# Altium footprint library Sensors.PcbLib: 9 footprints
Each footprint in its own frame and in the unit in brackets; x right, y up, seen from the top. Pads: shape width x height; smd on the part's side, far side on the other; paste and mask are expansions set on the pad; w line width, h text height; cw(c..) or ccw(c..) is an arc to the next point about the centre after c.
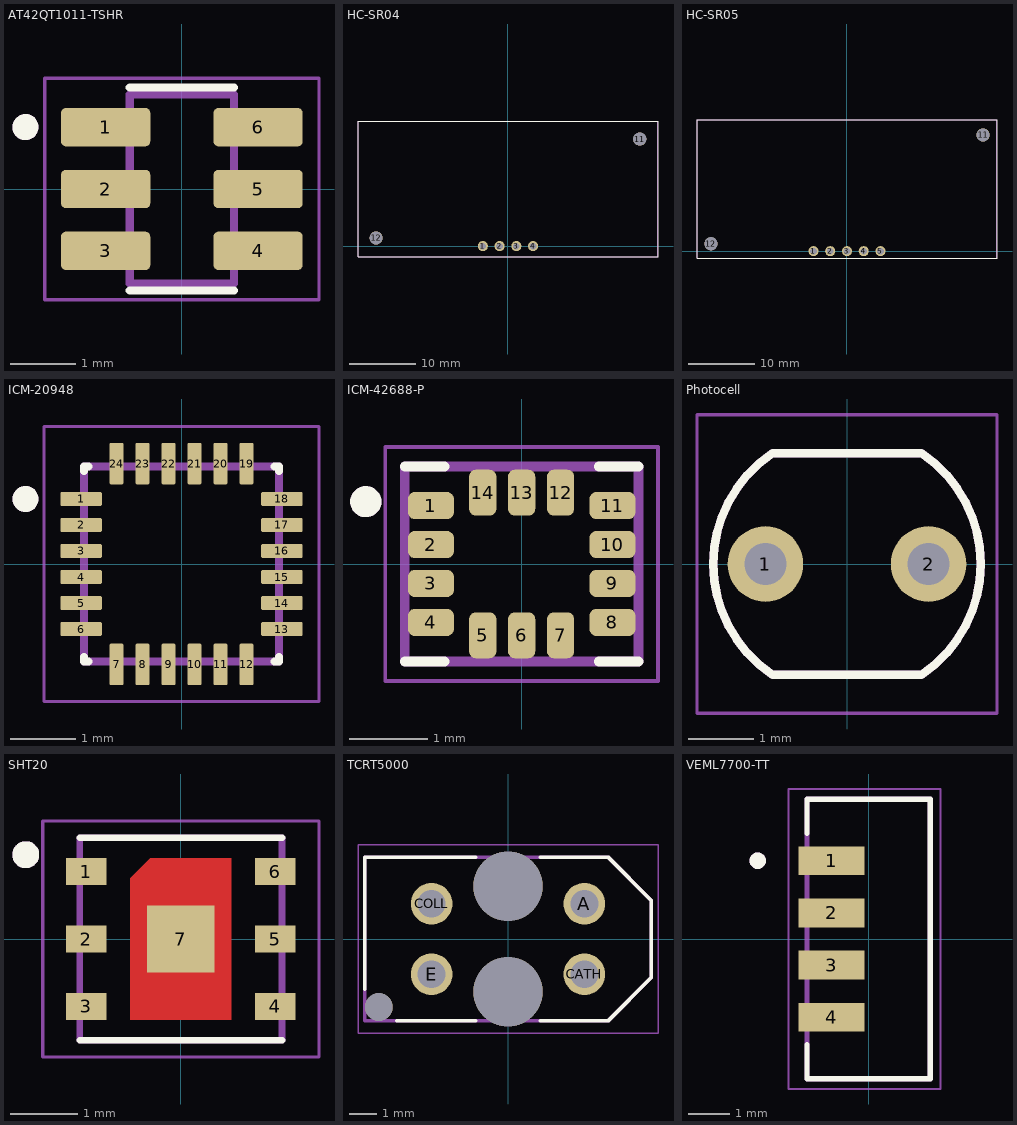
[diagram p0: the footprints below, top view; thin cyan lines are the x and y axes]

## AT42QT1011-TSHR [mm] "SOT95P280X145-6N"
height 1.45
pads (6):
  rrect25% 1.37x0.59 smd: 1(-1.17,0.95) 2(-1.17,0) 3(-1.17,-0.95) 4(1.17,-0.95) 5(1.17,0) 6(1.17,0.95)
Top Overlay:
  circle w0.2: c-2.4,0.95 r0.1
  lines w0.127: -0.8,-1.559 0.8,-1.559 ; -0.8,1.559 0.8,1.559
Mechanical 13:
  circle w0.2: c-2.4,0.95 r0.1
  lines w0.127: -0.8,-1.45 -0.8,1.45 0.8,1.45 0.8,-1.45 -0.8,-1.45
Mechanical 15:
  lines w0.05: -2.105,-1.7 -2.105,1.7 2.105,1.7 2.105,-1.7 -2.105,-1.7
3D body "step_temp.STEP": height 1.45, standoff 0, extent -1.4,-1.45 1.4,1.45

## HC-SR04 [mm] "HC-SR04"
pads (6):
  round 1.53 hole 1.02: 1(-3.81,0) 2(-1.27,0) 3(1.27,0) 4(3.81,0)
  round 2 hole 2: 11(20,16.238) 12(-20,1.238)
Top Overlay:
  lines w0.127: 22.741,18.91 -22.622,18.91 -22.635,18.91 -22.746,18.91 -22.746,-1.59 -22.745,-1.592 21.773,-1.592 22.55,-1.592 22.755,-1.592 22.755,18.906 22.755,18.91
Mechanical 15:
  lines w0.05: -22.75,-1.593 22.75,-1.593 22.75,18.923 -22.75,18.923 -22.75,-1.593
3D body "HC-SR04-01.STEP": height 15.25, standoff -0.55, extent -22.5,-1.27 22.5,18.73

## HC-SR05 [mm] "HC-SR05"
pads (7):
  round 1.53 hole 1.02: 1(-5.08,0) 2(-2.54,0) 3(0,0) 4(2.54,0) 5(5.08,0)
  round 2 hole 2: 11(20.635,17.635) 12(-20.635,1.111)
Top Overlay:
  lines w0.127: -22.746,-1.082 -22.746,19.418 -22.746,19.939 22.755,19.939 22.755,19.414 22.755,-1.084 22.55,-1.084 21.773,-1.084 -22.745,-1.084 -22.746,-1.082
Mechanical 15:
  lines w0.05: -22.75,-1.085 22.75,-1.085 22.75,19.939 -22.75,19.939 -22.75,-1.085
3D body "HY-SRF05-02.STEP": height 16.22, standoff -0.5, extent -22.65,-1.016 22.65,19.824

## ICM-20948 [mm] "QFN40P300X300X105-24N"
height 1.05
pads (24):
  rrect25% 0.64x0.22 smd: 1(-1.545,1) 2(-1.545,0.6) 3(-1.545,0.2) 4(-1.545,-0.2) 5(-1.545,-0.6) 6(-1.545,-1) 13(1.545,-1) 14(1.545,-0.6) 15(1.545,-0.2) 16(1.545,0.2) 17(1.545,0.6) 18(1.545,1)
  rrect25% 0.22x0.64 smd: 7(-1,-1.545) 8(-0.6,-1.545) 9(-0.2,-1.545) 10(0.2,-1.545) 11(0.6,-1.545) 12(1,-1.545) 19(1,1.545) 20(0.6,1.545) 21(0.2,1.545) 22(-0.2,1.545) 23(-0.6,1.545) 24(-1,1.545)
Top Overlay:
  circle w0.2: c-2.4,1 r0.1
  lines w0.127: -1.5,-1.43 -1.5,-1.5 -1.43,-1.5 ; -1.5,1.43 -1.5,1.5 -1.43,1.5 ; 1.43,-1.5 1.5,-1.5 1.5,-1.43 ; 1.43,1.5 1.5,1.5 1.5,1.43
Mechanical 13:
  circle w0.2: c-2.4,1 r0.1
  lines w0.127: -1.5,-1.5 1.5,-1.5 1.5,1.5 -1.5,1.5 -1.5,-1.5
Mechanical 15:
  lines w0.05: -2.115,-2.115 2.115,-2.115 2.115,2.115 -2.115,2.115 -2.115,-2.115
3D body "step_temp.STEP": height 1, standoff -0.05, extent -1.5,-1.5 1.5,1.5

## ICM-42688-P [mm] "PQFN50P300X250X97-14N"
pads (14):
  rrect50% 0.59x0.35 smd mask+0: 1(-1.165,0.75) 2(-1.165,0.25) 3(-1.165,-0.25) 4(-1.165,-0.75) 8(1.165,-0.75) 9(1.165,-0.25) 10(1.165,0.25) 11(1.165,0.75)
  rrect50% 0.35x0.59 smd mask+0: 5(-0.5,-0.915) 6(0,-0.915) 7(0.5,-0.915) 12(0.5,0.915) 13(0,0.915) 14(-0.5,0.915)
Top Overlay:
  circle w0.2: c-2,0.8 r0.1
  lines w0.127: -1.5,-1.25 -0.99,-1.25 ; -1.5,1.25 -0.99,1.25 ; 0.99,-1.25 1.5,-1.25 ; 0.99,1.25 1.5,1.25
Top Solder:
  drawing of 14 lines, arcs and shapes, not listed
Mechanical 13:
  circle w0.2: c-2,0.8 r0.1
  lines w0.127: -1.5,-1.25 1.5,-1.25 1.5,1.25 -1.5,1.25 -1.5,-1.25
Mechanical 15:
  lines w0.05: -1.75,-1.5 1.75,-1.5 1.75,1.5 -1.75,1.5 -1.75,-1.5
3D body "ICM-42688-P--3DModel-STEP-1.STEP": height 1, standoff 0.03, extent -1.5,-1.25 1.5,1.25

## Photocell [mm] "Photocell"
height 1.8
pads (2):
  round 1.158 hole 0.65: 1(-1.25,0) 2(1.25,0)
Top Overlay:
  lines w0.127: -2.05,-0.003 ccw(c-0.013,-0.003) -1.152,-1.692 ; -2.05,0.003 cw(c-0.013,0.003) -1.152,1.692 ; -1.14,-1.7 1.14,-1.7 ; -1.14,1.7 1.14,1.7 ; 1.152,-1.692 ccw(c0.013,-0.003) 2.05,-0.003 ; 1.152,1.692 cw(c0.013,0.003) 2.05,0.003
Mechanical 13:
  lines w0.127: -2.05,-0.003 ccw(c-0.013,-0.003) -1.152,-1.692 ; -2.05,0.003 cw(c-0.013,0.003) -1.152,1.692 ; -1.14,-1.7 1.14,-1.7 ; -1.14,1.7 1.14,1.7 ; 1.152,-1.692 ccw(c0.013,-0.003) 2.05,-0.003 ; 1.152,1.692 cw(c0.013,0.003) 2.05,0.003
Mechanical 15:
  lines w0.05: -2.3,-2.29 2.3,-2.29 2.3,2.29 -2.3,2.29 -2.3,-2.29
3D body "step_temp.STEP": height 1.8, standoff -38, extent -2.05,-1.7 2.05,1.7

## SHT20 [mm] "SHT20"
height 1.2
pads (7):
  rect 0.6x0.4 smd paste-1: 1(-1.4,1) 2(-1.4,0) 3(-1.4,-1) 4(1.4,-1) 5(1.4,0) 6(1.4,1)
  rect 1x1 smd paste-1 mask+0: 7(0,0)
Top Layer:
  region: 0.75,-1.2 -0.75,-1.2 -0.75,0.9 -0.45,1.2 0.75,1.2
Top Overlay:
  circle w0.2: c-2.3,1.25 r0.1
  lines w0.1: -1.5,-1.5 1.5,-1.5 ; -1.5,1.5 1.5,1.5
Top Paste:
  region: 0.7,-1.15 -0.7,-1.15 -0.7,0.875 -0.425,1.15 0.7,1.15
  region: 1.7,-1.2 1.2,-1.2 1.2,-0.8 1.7,-0.8
  region: 1.7,-0.2 1.2,-0.2 1.2,0.2 1.7,0.2
  region: 1.7,0.8 1.2,0.8 1.2,1.2 1.7,1.2
  region: -1.2,-1.2 -1.7,-1.2 -1.7,-0.8 -1.2,-0.8
  region: -1.2,-0.2 -1.7,-0.2 -1.7,0.2 -1.2,0.2
  region: -1.2,0.8 -1.7,0.8 -1.7,1.2 -1.2,1.2
Top Solder:
  region: 0.76,1.299 0.766,1.299 0.771,1.298 0.776,1.297 0.781,1.295 0.786,1.293 0.791,1.291 0.795,1.289 0.8,1.287 0.804,1.284 0.809,1.281 0.813,1.278 0.817,1.274 0.821,1.271 0.824,1.267 0.828,1.263 0.831,1.259 0.834,1.254 0.837,1.25 0.839,1.245 0.841,1.241 0.843,1.236 0.845,1.231 0.847,1.226 0.848,1.221 0.849,1.216 0.849,1.21 0.85,1.205 0.85,1.2 0.85,-1.2 0.85,-1.205 0.849,-1.21 0.849,-1.216 0.848,-1.221 0.847,-1.226 0.845,-1.231 0.843,-1.236 0.841,-1.241 0.839,-1.245 0.837,-1.25 0.834,-1.254 0.831,-1.259 0.828,-1.263 0.824,-1.267 0.821,-1.271 0.817,-1.274 0.813,-1.278 0.809,-1.281 0.804,-1.284 0.8,-1.287 0.795,-1.289 0.791,-1.291 0.786,-1.293 0.781,-1.295 0.776,-1.297 0.771,-1.298 0.766,-1.299 0.76,-1.299 0.755,-1.3 -0.755,-1.3 -0.76,-1.299 -0.766,-1.299 -0.771,-1.298 -0.776,-1.297 -0.781,-1.295 -0.786,-1.293 -0.791,-1.291 -0.795,-1.289 -0.8,-1.287 -0.804,-1.284 -0.809,-1.281 -0.813,-1.278 -0.817,-1.274 -0.821,-1.271 -0.824,-1.267 -0.828,-1.263 -0.831,-1.259 -0.834,-1.254 -0.837,-1.25 -0.839,-1.245 -0.841,-1.241 -0.843,-1.236 -0.845,-1.231 -0.847,-1.226 -0.848,-1.221 -0.849,-1.216 -0.849,-1.21 -0.85,-1.205 -0.85,-1.2 -0.85,0.9 -0.85,0.971 -0.521,1.3 0.755,1.3
Mechanical 13:
  circle w0.2: c-2.3,1.25 r0.1
  lines w0.1: -1.5,-1.5 1.5,-1.5 1.5,1.5 -1.5,1.5 -1.5,-1.5
Mechanical 15:
  lines w0.05: -2.05,-1.75 -2.05,1.75 2.05,1.75 2.05,-1.75 -2.05,-1.75
3D body "step_temp.STEP": height 1.05, standoff 0, extent -1.499,-1.506 1.501,1.494

## TCRT5000 [mm] "OPTO_TCRT5000"
pads (7):
  round 1.5 hole 1: A(2.75,1.27) CATH(2.75,-1.27) COLL(-2.75,1.27) E(-2.75,-1.27)
  round 1 hole 1 unplated: ""(-4.65,-2.45)
  round 2.5 hole 2.5 unplated: ""(0,-1.9) ""(0,1.9)
Top Overlay:
  lines w0.127: -5.15,-1.8 -5.15,2.95 -1.17,2.95 ; -4,-2.95 -1.17,-2.95 ; 1.17,-2.95 3.6,-2.95 5.15,-1.4 5.15,1.4 3.6,2.95 1.17,2.95
Mechanical 13:
  lines w0.127: -5.15,-2.95 3.6,-2.95 5.15,-1.4 5.15,1.4 3.6,2.95 -5.15,2.95 -5.15,-2.95
Mechanical 15:
  lines w0.05: -5.4,-3.4 5.4,-3.4 5.4,3.4 -5.4,3.4 -5.4,-3.4
3D body "TCRT5000--3DModel-STEP-56544.STEP": height 7.23, standoff -3.77, extent -5.101,-3.4 5.099,3.4

## VEML7700-TT [mm] "VEML7700-TT"
height 2.35
pads (4):
  rect 1.6x0.7 smd: 1(-0.9,1.905) 2(-0.9,0.635) 3(-0.9,-0.635) 4(-0.9,-1.905)
Top Overlay:
  circle w0.2: c-2.7,1.905 r0.1
  lines w0.127: -1.5,-2.575 -1.5,-3.4 1.5,-3.4 1.5,3.4 -1.5,3.4 -1.5,2.575
Mechanical 13:
  circle w0.2: c-2.7,1.905 r0.1
  lines w0.127: -1.5,-3.4 -1.5,3.4 1.5,3.4 1.5,-3.4 -1.5,-3.4
Mechanical 15:
  lines w0.05: -1.95,-3.65 1.75,-3.65 1.75,3.65 -1.95,3.65 -1.95,-3.65
3D body "step_temp.STEP": height 2.37, standoff 0.02, extent -1.5,-3.4 1.5,3.4